# Altium integrated library ATK-DNN647_V1.0.IntLib: 61 symbols
Pins are listed as number, name and electrical type; pins without a type are passive.

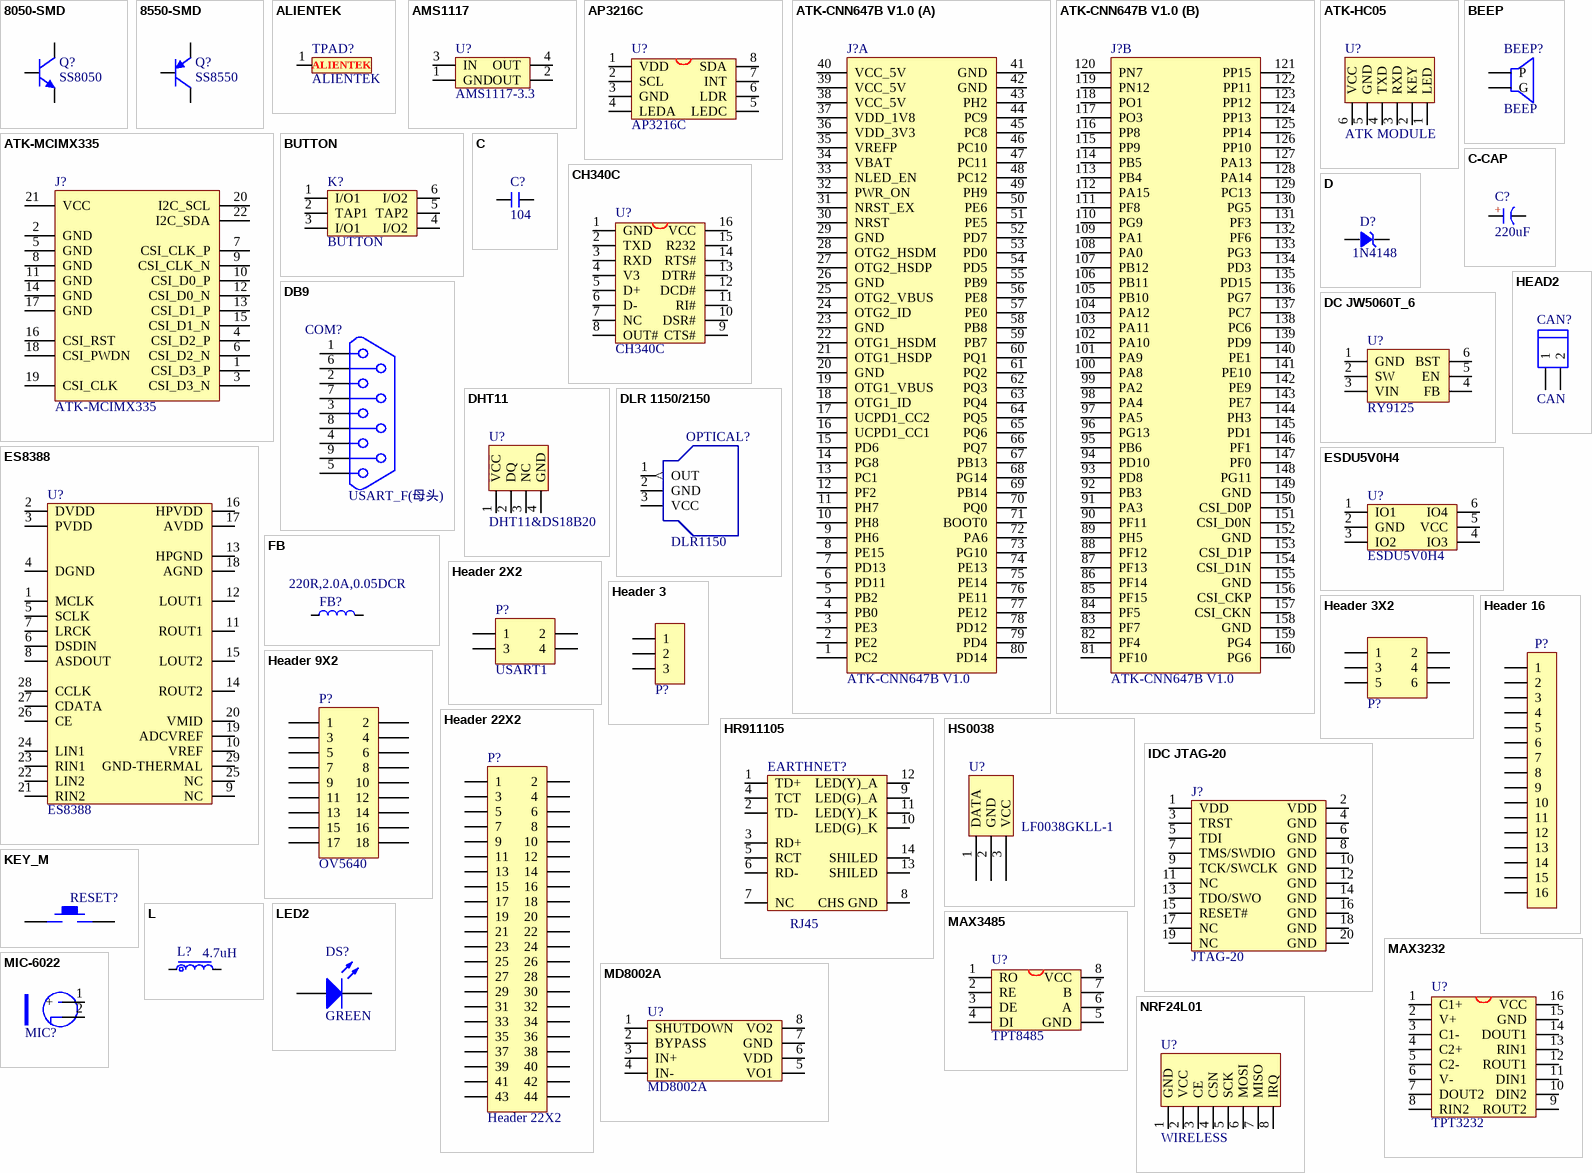
[diagram p0: symbols 8050-SMD to NRF24L01]

## 8050-SMD
designator Q?, comment SS8050
高频放大-NPN型; 版权归属: 正点原子; 属性: 40V 1.5A 1W 100MHZ; Parameter: 三极管; BOM名称: 高频放大-NPN型; 学习资源: www.openedv.com
footprint SOT23-3N (3x1.3x1mm(长宽高))
footprint SOT23-3L (3x1.3x1mm(长宽高))
pins: 1 B, 2 E, 3 C

## 8550-SMD
designator Q?, comment SS8550
高频放大-PNP型; 版权归属: 正点原子; 属性: 40V 1.5A 1W 100MHZ; Parameter: 三极管; BOM名称: 高频放大-PNP型; 学习资源: www.openedv.com
footprint SOT23-3N (3x1.3x1mm(长宽高))
footprint SOT23-3L (3x1.3x1mm(长宽高))
pins: 1 B, 2 E, 3 C

## ALIENTEK
designator TPAD?
footprint ATK_TPAD
pins: 1

## AMS1117
designator U?, comment AMS1117-3.3
footprint AMS1117
pins: 1 GND, 2 OUT, 3 IN, 4 OUT

## AP3216C
designator U?
ALS+PS Sensor
footprint QFN8 (QFN,8P,P0.97)
pins: 1 VDD, 2 SCL, 3 GND, 4 LEDA, 5 LEDC, 6 LDR, 7 INT, 8 SDA

## ATK-CNN647B V1.0
designator J?
Alientek CNN647B core board based on STMicroelectronics STM32N647X0H3Q, Version 1.0
footprint ATK-CNN647BBI V1.0
part A pins: 1 PC2, 2 PE2, 3 PE3, 4 PB0, 5 PB2, 6 PD11, 7 PD13, 8 PE15, 9 PH6, 10 PH8, 11 PH7, 12 PF2, 13 PC1, 14 PG8, 15 PD6, 16 UCPD1_CC1, 17 UCPD1_CC2, 18 OTG1_ID, 19 OTG1_VBUS, 20 GND, 21 OTG1_HSDP, 22 OTG1_HSDM, 23 GND, 24 OTG2_ID, 25 OTG2_VBUS, 26 GND, 27 OTG2_HSDP, 28 OTG2_HSDM, 29 GND, 30 NRST, 31 NRST_EX, 32 PWR_ON, 33 NLED_EN, 34 VBAT, 35 VREFP, 36 VDD_3V3, 37 VDD_1V8, 38 VCC_5V, 39 VCC_5V, 40 VCC_5V, 41 GND, 42 GND, 43 PH2, 44 PC9, 45 PC8, 46 PC10, 47 PC11, 48 PC12, 49 PH9, 50 PE6, 51 PE5, 52 PD7, 53 PD0, 54 PD5, 55 PB9, 56 PE8, 57 PE0, 58 PB8, 59 PB7, 60 PQ1, 61 PQ2, 62 PQ3, 63 PQ4, 64 PQ5, 65 PQ6, 66 PQ7, 67 PB13, 68 PG14, 69 PB14, 70 PQ0, 71 BOOT0, 72 PA6, 73 PG10, 74 PE13, 75 PE14, 76 PE11, 77 PE12, 78 PD12, 79 PD4, 80 PD14
part B pins: 81 PF10, 82 PF4, 83 PF7, 84 PF5, 85 PF15, 86 PF14, 87 PF13, 88 PF12, 89 PH5, 90 PF11, 91 PA3, 92 PB3, 93 PD8, 94 PD10, 95 PB6, 96 PG13, 97 PA5, 98 PA4, 99 PA2, 100 PA8, 101 PA9, 102 PA10, 103 PA11, 104 PA12, 105 PB10, 106 PB11, 107 PB12, 108 PA0, 109 PA1, 110 PG9, 111 PF8, 112 PA15, 113 PB4, 114 PB5, 115 PP9, 116 PP8, 117 PO3, 118 PO1, 119 PN12, 120 PN7, 121 PP15, 122 PP11, 123 PP12, 124 PP13, 125 PP14, 126 PP10, 127 PA13, 128 PA14, 129 PC13, 130 PG5, 131 PF3, 132 PF6, 133 PG3, 134 PD3, 135 PD15, 136 PG7, 137 PC7, 138 PC6, 139 PD9, 140 PE1, 141 PE10, 142 PE9, 143 PE7, 144 PH3, 145 PD1, 146 PF1, 147 PF0, 148 PG11, 149 GND, 150 CSI_D0P, 151 CSI_D0N, 152 GND, 153 CSI_D1P, 154 CSI_D1N, 155 GND, 156 CSI_CKP, 157 CSI_CKN, 158 GND, 159 PG4, 160 PG6

## ATK-HC05
designator U?, comment ATK MODULE
ATK-HC05
footprint HEAD6 (PIN:2.54mm;HEAD;)
pins: 1 LED, 2 KEY, 3 RXD, 4 TXD, 5 GND, 6 VCC

## ATK-MCIMX335
designator J?
Alientek camera module, IMX335, MIPI-CSI
footprint PinSocket_2x11_P2.00mm_Vertical
pins: 1 CSI_D3_P, 2 GND, 3 CSI_D3_N, 4 CSI_D2_P, 5 GND, 6 CSI_D2_N, 7 CSI_CLK_P, 8 GND, 9 CSI_CLK_N, 10 CSI_D0_P, 11 GND, 12 CSI_D0_N, 13 CSI_D1_P, 14 GND, 15 CSI_D1_N, 16 CSI_RST, 17 GND, 18 CSI_PWDN, 19 CSI_CLK, 20 I2C_SCL, 21 VCC, 22 I2C_SDA

## BEEP
designator BEEP?
footprint BELL-5 (PIN:5MM,SIZE:10MM)
pins: 1 P, 2 G

## BUTTON
designator K?
footprint BTN8.5*8.5 (8.5MM*8.5MM)
pins: 1 I/O1, 2 TAP1, 3 I/O1, 4 I/O2, 5 TAP2, 6 I/O2

## C
designator C?, comment 104
无极性电容; BOM名称: 无极性贴片电容; 版权归属: 正点原子; 学习资源: www.openedv.com
footprint C 0402 (无极性贴片电容)
footprint C 0603 (无极性贴片电容)
footprint C 0805 (无极性贴片电容)
footprint C 1206 (无极性贴片电容)
pins: 1, 2

## C-CAP
designator C?, comment 220uF
有极性电容; 版权归属: 正点原子; 学习资源: www.openedv.com; BOM名称: 有极性电容
footprint CD 6.3*5.4 S (有极性贴片电容(直径6.3mm高5.4mm))
pins: 1 A, 2 K
text: +

## CH340C
designator U?
USB2UART
footprint SOP16M (Small Outline; 16 Leads; Body Width 3.9 mm; Pitch 1.27 mm)
pins: 1 GND, 2 TXD, 3 RXD, 4 V3, 5 D+, 6 D-, 7 NC, 8 OUT#, 9 CTS#, 10 DSR#, 11 RI#, 12 DCD#, 13 DTR#, 14 RTS#, 15 R232, 16 VCC

## D
designator D?, comment 1N4148
稳压二极管
footprint SOD-80
footprint SOD-123 (二极管)
footprint SMA (二极管 SMA)
pins: 1, 2

## DB9
designator COM?, comment USART_F(母头)
footprint DB9
pins: 1, 2, 3, 4, 5, 6, 7, 8, 9
2 alternate drawings of the same symbol

## DC JW5060T_6
designator U?, comment RY9125
DC降压芯片
footprint SOT23-6N (3x1.6x1.1mm(长宽高))
footprint SOT23-6N (3x1.6x1.1mm(长宽高))
pins: 1 GND, 2 SW, 3 VIN, 4 FB, 5 EN, 6 BST

## DHT11
designator U?, comment DHT11&DS18B20
数字温湿度传感器
footprint DHT11 (2.54mm)
pins: 1 VCC, 2 DQ, 3 NC, 4 GND

## DLR 1150/2150
designator OPTICAL?, comment DLR1150
音频光纤接收座
footprint DLR-1150 / 2150 (光纤接收座13.55x9.70x12.00)
pins: 1 OUT (out), 2 GND (power), 3 VCC (power)

## ES8388
designator U?
24bit ADC&DAC 96Khz
footprint qfn28 (QFN, 28-Leads, Body 4.0x4.0mm (max), Pitch 0.45mm, ES8388)
pins: 1 MCLK, 2 DVDD, 3 PVDD, 4 DGND, 5 SCLK, 6 DSDIN, 7 LRCK, 8 ASDOUT, 9 NC, 10 VREF, 11 ROUT1, 12 LOUT1, 13 HPGND, 14 ROUT2, 15 LOUT2, 16 HPVDD, 17 AVDD, 18 AGND, 19 ADCVREF, 20 VMID, 21 RIN2, 22 LIN2, 23 RIN1, 24 LIN1, 25 NC, 26 CE, 27 CDATA, 28 CCLK, 29 GND-THERMAL

## ESDU5V0H4
designator U?
4路 ESD，USB2.0/USB3.0适用
footprint SOT23-6N (3x1.6x1.1mm(长宽高))
pins: 1 IO1, 2 GND, 3 IO2, 4 IO3, 5 VCC, 6 IO4

## FB
designator FB?, comment 220R,2.0A,0.05DCR
贴片磁珠; BOM名称: 小功率贴片电感; 版权归属: 正点原子; Parameter: 电感/磁珠; 学习资源: www.openedv.com
footprint L 0603 (小功率贴片电感)
footprint L 0603 (贴片电感-0603)
pins: 1, 2

## HEAD2
designator CAN?, comment CAN
footprint HEAD2L-0.8 (10.16mm*10.16mm,pin:5.08mm)
pins: 1, 2

## Header 2X2
designator P?, comment USART1
2*2P接插件; 版权归属: 正点原子; Parameter: 接插件; BOM名称: 2*2P接插件; 学习资源: www.openedv.com
footprint Header 2.54 2X2P (排针(2X2P,2.54,直插))
pins: 1, 2, 3, 4

## Header 3
designator P?, comment Header 1X3  (value not drawn)
3P接插件; 版权归属: 正点原子; Parameter: 接插件; BOM名称: 3P接插件; 学习资源: www.openedv.com
footprint Header 2.54 1X3P (排针(1X3P,2.54,直插))
pins: 1, 2, 3

## Header 3X2
designator P?, comment Header 2X3  (value not drawn)
3*2P接插件; 版权归属: 正点原子; Parameter: 接插件; BOM名称: 3*2P接插件; 学习资源: www.openedv.com
footprint Header 2.54 2X3P (排针(2X3P,2.54,直插))
pins: 1, 2, 3, 4, 5, 6

## Header 9X2
designator P?, comment OV5640
Header, 9-Pin, Dual row; LatestRevisionDate: 17-Jul-2002; LatestRevisionNote: Re-released for DXP Platform.; Publisher: Altium Limited
footprint FPC 0.5 18P H-S (FPC座 0.5mm 18P 卧式贴片)
pins: 1, 2, 3, 4, 5, 6, 7, 8, 9, 10, 11, 12, 13, 14, 15, 16, 17, 18

## Header 16
designator P?, comment HDR-1X16  (value not drawn)
16P接插件; 版权归属: 正点原子; Parameter: 接插件; BOM名称: 16P接插件; 学习资源: www.openedv.com
footprint Header 2.54 1X16P (排针(1X16P,2.54,直插))
pins: 1, 2, 3, 4, 5, 6, 7, 8, 9, 10, 11, 12, 13, 14, 15, 16

## Header 22X2
designator P?
22*2P接插件; 版权归属: 正点原子; Parameter: 接插件; 学习资源: www.openedv.com
footprint Header 2.54 2X22P (排针(2X22P,2.54,直插))
pins: 1, 2, 3, 4, 5, 6, 7, 8, 9, 10, 11, 12, 13, 14, 15, 16, 17, 18, 19, 20, 21, 22, 23, 24, 25, 26, 27, 28, 29, 30, 31, 32, 33, 34, 35, 36, 37, 38, 39, 40, 41, 42, 43, 44

## HR911105
designator EARTHNET?, comment RJ45
footprint HR911105A (NET_WORK)
pins: 1 TD+, 2 TD-, 3 RD+, 4 TCT, 5 RCT, 6 RD-, 7 NC, 8 CHS GND, 9 LED(G)_A, 10 LED(G)_K, 11 LED(Y)_K, 12 LED(Y)_A, 13 SHILED, 14 SHILED

## HS0038
designator U?, comment LF0038GKLL-1
footprint IR-LF0038GKLL-1 (Footprint not found)
pins: 1 DATA, 2 GND, 3 VCC

## IDC JTAG-20
designator J?, comment JTAG-20
20Pin JTAG 2.54间距; 版权归属: 正点原子; Parameter: 接口器件; 学习资源: www.openedv.com
footprint IDC 2.54-2*10P JTAG (简易牛角座(2*10P,2.54,直插))
pins: 1 VDD, 2 VDD, 3 TRST, 4 GND, 5 TDI, 6 GND, 7 TMS/SWDIO, 8 GND, 9 TCK/SWCLK, 10 GND, 11 NC, 12 GND, 13 TDO/SWO, 14 GND, 15 RESET#, 16 GND, 17 NC, 18 GND, 19 NC, 20 GND

## KEY_M
designator RESET?  (value not drawn)
footprint KEY_M (KEY_MID)
pins: 1, 2

## L
designator L?, comment 4.7uH
电感; BOM名称: 功率屏蔽电感; 版权归属: 正点原子; Parameter: 电感/磁珠; 学习资源: www.openedv.com
footprint L-0420 (贴片电感-0420)
pins: 1, 2

## LED2
designator DS?, comment GREEN
Typical RED, GREEN, YELLOW, AMBER GaAs LED; Published: 8-Jun-2000; LatestRevisionDate: 17-Jul-2002; LatestRevisionNote: Re-released for DXP Platform.; PackageDocument: Feb-2002; PackageReference: 3.2X1.6X1.1; Publisher: Altium Limited
footprint SMDLED
pins: 1 A, 2 K

## MAX3232
designator U?, comment TPT3232
footprint SOP16M
pins: 1 C1+, 2 V+, 3 C1-, 4 C2+, 5 C2-, 6 V-, 7 DOUT2, 8 RIN2, 9 ROUT2, 10 DIN2, 11 DIN1, 12 ROUT1, 13 RIN1, 14 DOUT1, 15 GND, 16 VCC

## MAX3485
designator U?, comment TPT8485
footprint SOP-8 (SOP)
pins: 1 RO, 2 RE, 3 DE, 4 DI, 5 GND, 6 A, 7 B, 8 VCC

## MD8002A
designator U?
5V, 3W, 功放IC
footprint SOP-8 (SOP)
pins: 1 SHUTDOWN, 2 BYPASS, 3 IN+, 4 IN-, 5 VO1, 6 VDD, 7 GND, 8 VO2

## MIC-6022
designator MIC?  (value not drawn)
MIC
footprint MIC-6022
pins: 1 +, 2 GND

## NRF24L01
designator U?, comment WIRELESS
footprint NRF24L01
pins: 1 GND, 2 VCC, 3 CE, 4 CSN, 5 SCK, 6 MOSI, 7 MISO, 8 IRQ

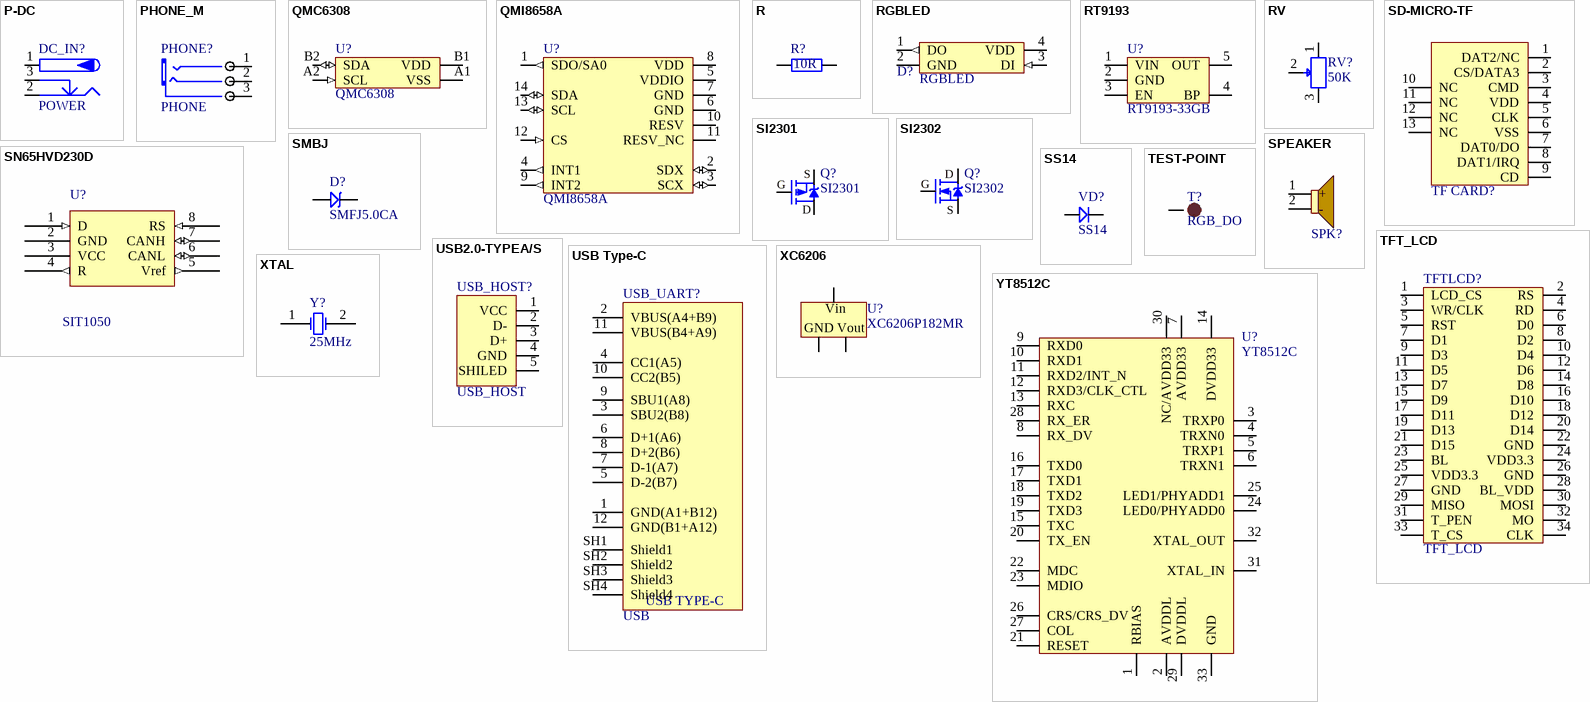
[diagram p1: symbols P-DC to YT8512C]

## P-DC
designator DC_IN?, comment POWER
低压电源接口; BOM名称: DC电源接口; 版权归属: 源创客; 学习资源: www.ooocke.com
footprint DC10B
pins: 1 (power), 2 (power), 3 (power)

## PHONE_M
designator PHONE?, comment PHONE
footprint PHONE_ST
pins: 1 CHL, 2 CHR, 3 COM

## QMC6308
designator U?
三轴磁力计,1.8V VDD
footprint WLCSP-4 (WLCSP-4_L0.8-W0.8-R2-C2-P0.40-BL)
pins: A1 VSS (power), A2 SCL (in), B1 VDD (power), B2 SDA (io)

## QMI8658A
designator U?
六轴传感器
footprint LGA14 (LGA-14_L3.0-W2.5-P0.50-TL)
pins: 1 SDO/SA0 (out), 2 SDX (io), 3 SCX (io), 4 INT1 (out), 5 VDDIO (power), 6 GND (power), 7 GND (power), 8 VDD (power), 9 INT2 (out), 10 RESV (power), 11 RESV_NC (power), 12 CS (in), 13 SCL (io), 14 SDA (io)

## R
designator R?, comment 10R
电阻; BOM名称: 贴片电阻; 版权归属: 正点原子; 学习资源: www.openedv.com; Parameter: 电阻
footprint R 0402 (1/16W贴片电阻)
footprint R 0805 (1/8W贴片电阻)
pins: 1, 2

## RGBLED
designator D?
0807, WS2812, RGBLED
footprint RGBLED_0807 (0807, RGBLED, WS2812)
pins: 1 DO (out), 2 GND (power), 3 DI (in), 4 VDD (power)

## RT9193
designator U?, comment RT9193-33GB
LDO 5.5V 300mA; BOM名称: 稳压芯片; 版权归属: 正点原子; Parameter: 芯片; 学习资源: www.openedv.com
footprint SOT23-5N (3x1.6x1.1mm(长宽高))
pins: 1 VIN, 2 GND, 3 EN, 4 BP, 5 OUT

## RV
designator RV?, comment 50K
footprint RV
pins: 1, 2, 3

## SD-MICRO-TF
designator TF CARD?  (value not drawn)
SD,MICRO,TF
footprint SD-MICRO-TF
pins: 1 DAT2/NC, 2 CS/DATA3, 3 CMD, 4 VDD, 5 CLK, 6 VSS, 7 DAT0/DO, 8 DAT1/IRQ, 9 CD, 10 NC, 11 NC, 12 NC, 13 NC

## SI2301
designator Q?
PMOS -20V-2.8A 120mΩ; BOM名称: P沟道场效应管; 版权归属: 正点原子; Parameter: MOS管; 学习资源: www.openedv.com
footprint SOT23-3N (3x1.3x1mm(长宽高))
footprint SOT23-3L (3x1.3x1mm(长宽高))
pins: 1 G, 2 S, 3 D

## SI2302
designator Q?
NMOS 20V-+3.0A 55mΩ; BOM名称: N沟道场效应管; 版权归属: 正点原子; Parameter: MOS管; 学习资源: www.openedv.com
footprint SOT23-3N (3x1.3x1mm(长宽高))
footprint SOT23-3L (3x1.3x1mm(长宽高))
pins: 1 G, 2 S, 3 D

## SMBJ
designator D?, comment SMFJ5.0CA
TVS
footprint SOD-123
footprint SOD-123
pins: 1, 2

## SN65HVD230D
designator U?, comment SIT1050
footprint SOP-8 (SSOP8)
pins: 1 D (in), 2 GND (power), 3 VCC (power), 4 R (out), 5 Vref (out), 6 CANL (io), 7 CANH (io), 8 RS (in)
2 alternate drawings of the same symbol

## SPEAKER
designator SPK?, comment 2307  (value not drawn)
2307喇叭，8Ω 1W，23mm*7mm，2P
footprint SPEAKER (2307喇叭，8Ω，1W，23mm*7mm，2P)
pins: 1 +, 2 -

## SS14
designator VD?
肖特基二极管; 版权归属: 源创客; 属性: 40V/1A; BOM名称: 肖特基二极管; 学习资源: www.ooocke.com
footprint SOD-123 (2.7x1.6X1.1mm（长宽高，不包括引脚）)
footprint SMA (4.5x2.6*2.2mm（长宽高，不包括引脚）)
pins: 1 A, 2 K

## TEST-POINT
designator T?, comment RGB_DO
测试点
footprint TEST 1.2 (测试点1.2mm)
pins: 1

## TFT_LCD
designator TFTLCD?
footprint DB2*17-4.3 (DB_LCD-4.3')
pins: 1 LCD_CS, 2 RS, 3 WR/CLK, 4 RD, 5 RST, 6 D0, 7 D1, 8 D2, 9 D3, 10 D4, 11 D5, 12 D6, 13 D7, 14 D8, 15 D9, 16 D10, 17 D11, 18 D12, 19 D13, 20 D14, 21 D15, 22 GND, 23 BL, 24 VDD3.3, 25 VDD3.3, 26 GND, 27 GND, 28 BL_VDD, 29 MISO, 30 MOSI, 31 T_PEN, 32 MO, 33 T_CS, 34 CLK

## USB2.0-TYPEA/S
designator USB_HOST?, comment USB_HOST
USB-A型母接口; 版权归属: 正点原子; Parameter: 接口器件; BOM名称: USB-A型母接口; 学习资源: www.openedv.com
footprint USB 2.0_TEPE A AF90 (USB 2.0_TEPE A 型母头，侧插)
pins: 1 VCC, 2 D-, 3 D+, 4 GND, 5 SHILED

## USB Type-C
designator USB_UART?, comment USB
12P TypeC 母座
footprint USB Type-C
footprint USB Type-C (USB Type-C 12P/16P)
pins: 1 GND(A1+B12), 2 VBUS(A4+B9), 3 SBU2(B8), 4 CC1(A5), 5 D-2(B7), 6 D+1(A6), 7 D-1(A7), 8 D+2(B6), 9 SBU1(A8), 10 CC2(B5), 11 VBUS(B4+A9), 12 GND(B1+A12), SH1 Shield1, SH2 Shield2, SH3 Shield3, SH4 Shield4
text: USB TYPE-C

## XC6206
designator U?, comment XC6206P182MR
LDO 5.5V 200-300mA; 版权归属: 正点原子; Parameter: 芯片; Package: SOT-23; 学习资源: www.openedv.com
footprint SOT23-3L (3x1.3x1mm(长宽高))
footprint SOT23-3N (3x1.3x1mm(长宽高))
pins: 1 GND, 2 Vout, 3 Vin

## XTAL
designator Y?, comment 25MHz
Crystal Oscillator; Published: 8-Jun-2000; LatestRevisionDate: 17-Jul-2002; LatestRevisionNote: Re-released for DXP Platform.; Publisher: Altium Limited
footprint XTAL_US
pins: 1 OSC1, 2 OSC2

## YT8512C
designator U?
10M/100M 网络PHY RMII/MII
footprint YT8512C
pins: 1 RBIAS, 2 AVDDL, 3 TRXP0, 4 TRXN0, 5 TRXP1, 6 TRXN1, 7 AVDD33, 8 RX_DV, 9 RXD0, 10 RXD1, 11 RXD2/INT_N, 12 RXD3/CLK_CTL, 13 RXC, 14 DVDD33, 15 TXC, 16 TXD0, 17 TXD1, 18 TXD2, 19 TXD3, 20 TX_EN, 21 RESET, 22 MDC, 23 MDIO, 24 LED0/PHYADD0, 25 LED1/PHYADD1, 26 CRS/CRS_DV, 27 COL, 28 RX_ER, 29 DVDDL, 30 NC/AVDD33, 31 XTAL_IN, 32 XTAL_OUT, 33 GND